# Altium footprint library SYNCBOX_V3I1.PcbLib: 251 footprints (part 4 of 16)
Each footprint in its own frame and in the unit in brackets; x right, y up, seen from the top. Pads: shape width x height; smd on the part's side, far side on the other; paste and mask are expansions set on the pad; w line width, h text height; cw(c..) or ccw(c..) is an arc to the next point about the centre after c.
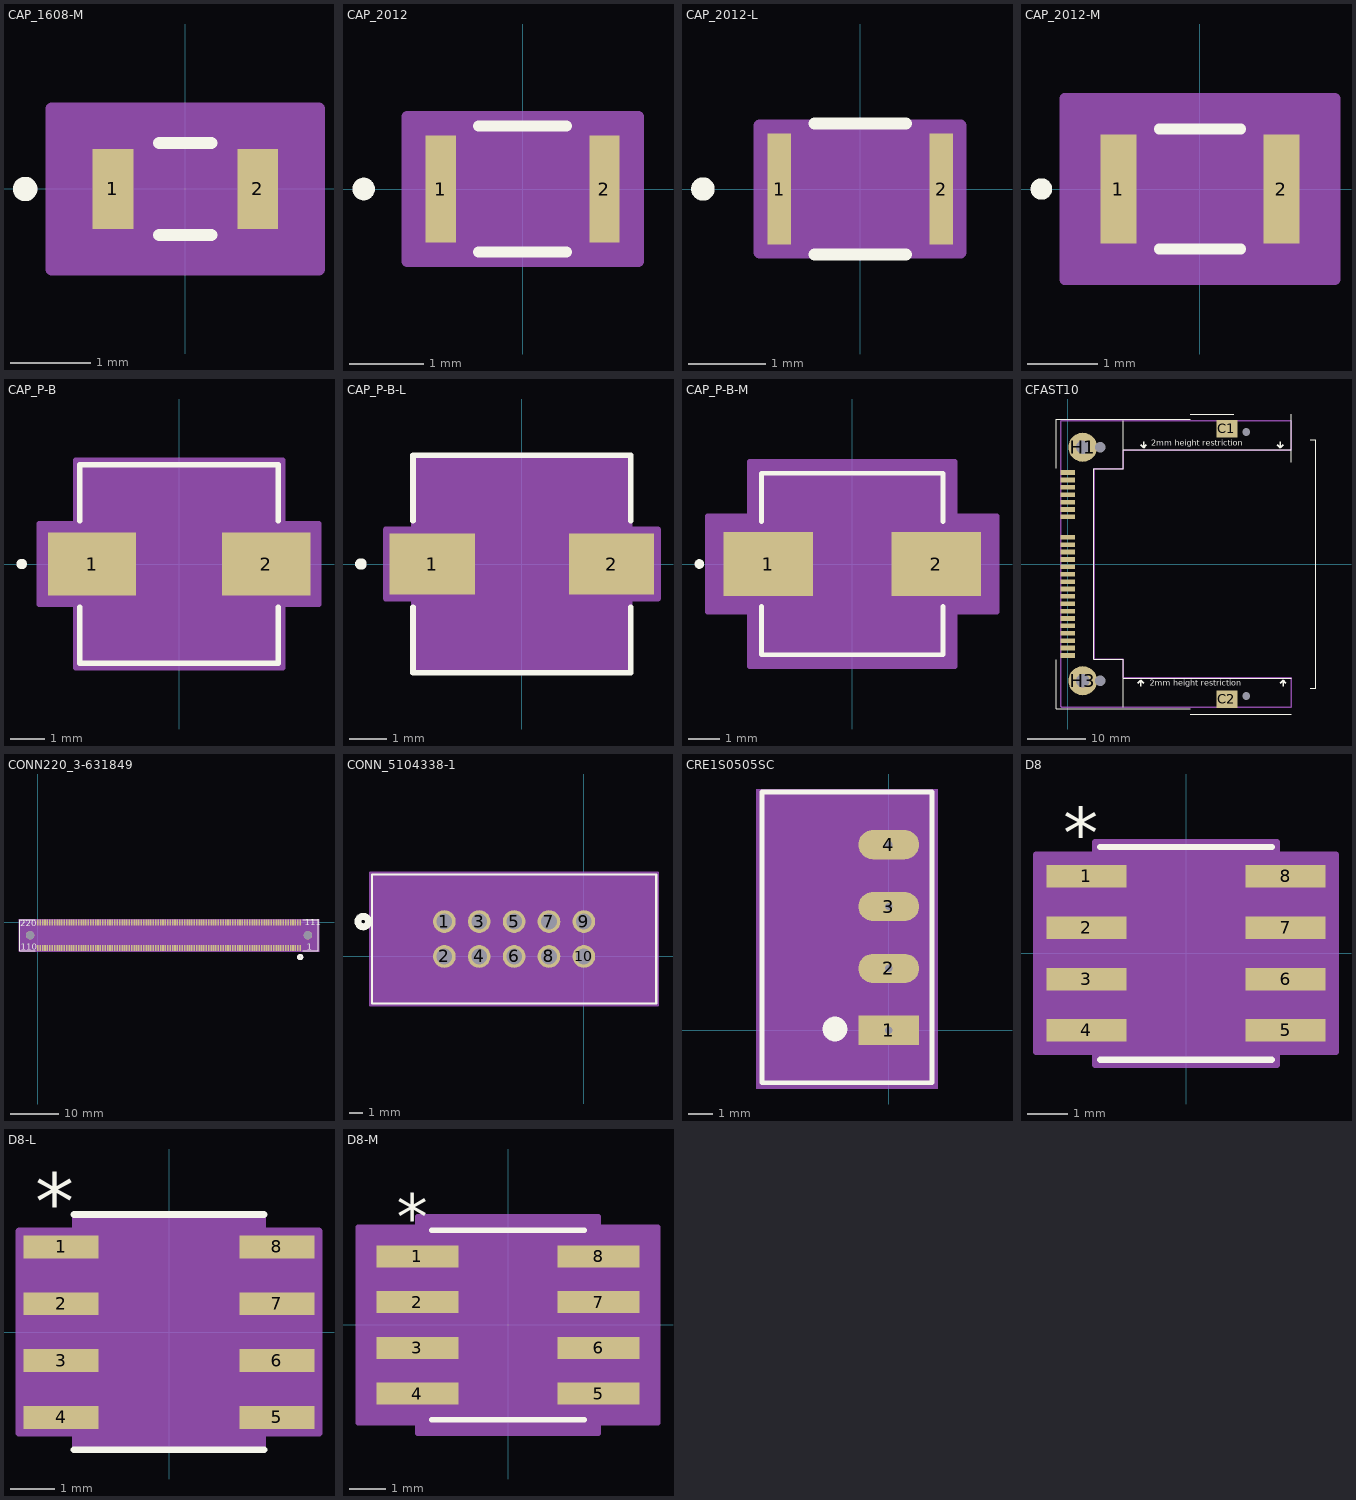
[diagram p3: the footprints below, top view; thin cyan lines are the x and y axes]

## CAP_1608-M [mil]
pads (2):
  rect 20x39 smd paste+0 mask+0: 1(-35.5,0) 2(35.5,0)
Top Overlay:
  circle w6: c-78.5,0 r3
  lines w6: -12.75,-22.5 12.75,-22.5 ; -12.75,22.5 12.75,22.5
Mechanical 13:
  circle w0: c-30.5,0 r3
  lines w1: -33.5,-17.5 -33.5,17.5 ; -33.5,-17.5 -25.5,-17.5 -25.5,17.5 -33.5,17.5 ; -33.5,-17.5 33.5,-17.5 ; -33.5,-17.5 -33.5,17.5 ; -33.5,17.5 33.5,17.5 ; 33.5,-17.5 25.5,-17.5 25.5,17.5 33.5,17.5 ; 33.5,-17.5 33.5,17.5 ; 33.5,-17.5 33.5,17.5
Mechanical 15:
  region: 65.5,-39.5 -65.5,-39.5 -65.5,39.5 65.5,39.5
  lines w6: -65.5,-39.5 -65.5,39.5 65.5,39.5 65.5,-39.5 -65.5,-39.5
3D body "CAP_1608-M.stp": height 35, standoff 0, extent -33.5,-17.48 33.51,17.48
3D body: height 10, standoff 0, extent 0,0 10,10

## CAP_2012 [mil]
pads (2):
  rect 16x57 smd paste+0 mask+0: 1(-43.5,0) 2(43.5,0)
Top Overlay:
  circle w6: c-84.5,0 r3
  lines w6: -23.39,-33.5 23.39,-33.5 ; -23.39,33.5 23.39,33.5
Mechanical 13:
  circle w0: c-38.5,0 r3
  lines w1: -43.5,-28.5 -43.5,28.5 ; -43.5,-28.5 -35.5,-28.5 -35.5,28.5 -43.5,28.5 ; -43.5,-28.5 43.5,-28.5 ; -43.5,-28.5 -43.5,28.5 ; -43.5,28.5 43.5,28.5 ; 43.5,-28.5 35.5,-28.5 35.5,28.5 43.5,28.5 ; 43.5,-28.5 43.5,28.5 ; 43.5,-28.5 43.5,28.5
Mechanical 15:
  region: 61.5,-38.5 -61.5,-38.5 -61.5,38.5 61.5,38.5
  lines w6: -61.5,-38.5 -61.5,38.5 61.5,38.5 61.5,-38.5 -61.5,-38.5
3D body: height 10, standoff 0, extent 0,0 10,10
3D body "CAP_2012.stp": height 49.02, standoff 0, extent -43.5,-28.5 43.5,28.5

## CAP_2012-L [mil]
pads (2):
  rect 12x57 smd paste+0 mask+0: 1(-41.5,0) 2(41.5,0)
Top Overlay:
  circle w6: c-80.5,0 r3
  lines w6: -23.39,-33.5 23.39,-33.5 ; -23.39,33.5 23.39,33.5
Mechanical 13:
  circle w0: c-36.5,0 r3
  lines w1: -43.5,-28.5 -43.5,28.5 ; -43.5,-28.5 -35.5,-28.5 -35.5,28.5 -43.5,28.5 ; -43.5,-28.5 43.5,-28.5 ; -43.5,-28.5 -43.5,28.5 ; -43.5,28.5 43.5,28.5 ; 43.5,-28.5 35.5,-28.5 35.5,28.5 43.5,28.5 ; 43.5,-28.5 43.5,28.5 ; 43.5,-28.5 43.5,28.5
Mechanical 15:
  region: 51.5,-32.5 -51.5,-32.5 -51.5,32.5 51.5,32.5
  lines w6: -51.5,-32.5 -51.5,32.5 51.5,32.5 51.5,-32.5 -51.5,-32.5
3D body: height 10, standoff 0, extent 0,0 10,10
3D body "CAP_2012-L.stp": height 49.02, standoff 0, extent -43.5,-28.5 43.51,28.51

## CAP_2012-M [mil]
pads (2):
  rect 20x61 smd paste+0 mask+0: 1(-45.5,0) 2(45.5,0)
Top Overlay:
  circle w6: c-88.5,0 r3
  lines w6: -22.75,-33.5 22.75,-33.5 ; -22.75,33.5 22.75,33.5
Mechanical 13:
  circle w0: c-40.5,0 r3
  lines w1: -43.5,-28.5 -43.5,28.5 ; -43.5,-28.5 -35.5,-28.5 -35.5,28.5 -43.5,28.5 ; -43.5,-28.5 43.5,-28.5 ; -43.5,-28.5 -43.5,28.5 ; -43.5,28.5 43.5,28.5 ; 43.5,-28.5 35.5,-28.5 35.5,28.5 43.5,28.5 ; 43.5,-28.5 43.5,28.5 ; 43.5,-28.5 43.5,28.5
Mechanical 15:
  region: 75.5,-50.5 -75.5,-50.5 -75.5,50.5 75.5,50.5
  lines w6: -75.5,-50.5 -75.5,50.5 75.5,50.5 75.5,-50.5 -75.5,-50.5
3D body: height 10, standoff 0, extent 0,0 10,10
3D body "CAP_2012-M.stp": height 49.02, standoff 0, extent -43.5,-28.5 43.51,28.51

## CAP_P-B [mil]
pads (2):
  rect 101x72 smd paste+0 mask+0: 1(-99.5,0) 2(99.5,0)
Top Overlay:
  circle w6: c-180,0 r3
  lines w6: -113.5,-49.1 -113.5,-113.5 113.5,-113.5 113.5,-49.1 ; -113.5,49.1 -113.5,113.5 113.5,113.5 113.5,49.1
Mechanical 13:
  circle w0: c-88.5,0 r3
  lines w1: -108.5,-54.25 -54.25,-108.5 ; -108.5,54.25 -54.25,108.5 ; -108.5,-108.5 108.5,-108.5 108.5,108.5 -108.5,108.5 -108.5,-108.5
Mechanical 15:
  region: -118.5,-46 -160,-46 -160,46 -118.5,46 -118.5,118.5 118.5,118.5 118.5,46 160,46 160,-46 118.5,-46 118.5,-118.5 -118.5,-118.5
  lines w6: -160,-46 -160,46 -118.5,46 -118.5,118.5 118.5,118.5 118.5,46 160,46 160,-46 118.5,-46 118.5,-118.5 -118.5,-118.5 -118.5,-46 -160,-46
3D body: height 10, standoff 0, extent 0,0 10,10
3D body "P-B.step": height 234.09, standoff 0, extent -122,-108.5 122.01,108.51

## CAP_P-B-L [mil]
pads (2):
  rect 89x64 smd paste+0 mask+0: 1(-93.5,0) 2(93.5,0)
Top Overlay:
  circle w6: c-168,0 r3
  lines w6: -113.5,-45.1 -113.5,-113.5 113.5,-113.5 113.5,-45.1 ; -113.5,45.1 -113.5,113.5 113.5,113.5 113.5,45.1
Mechanical 13:
  circle w0: c-88.5,0 r3
  lines w1: -108.5,-54.25 -54.25,-108.5 ; -108.5,54.25 -54.25,108.5 ; -108.5,-108.5 108.5,-108.5 108.5,108.5 -108.5,108.5 -108.5,-108.5
Mechanical 15:
  region: -112.5,-36 -142,-36 -142,36 -112.5,36 -112.5,112.5 112.5,112.5 112.5,36 142,36 142,-36 112.5,-36 112.5,-112.5 -112.5,-112.5
  lines w6: -142,-36 -142,36 -112.5,36 -112.5,112.5 112.5,112.5 112.5,36 142,36 142,-36 112.5,-36 112.5,-112.5 -112.5,-112.5 -112.5,-36 -142,-36
3D body: height 10, standoff 0, extent 0,0 10,10
3D body "P-B-L.step": height 234.09, standoff 0, extent -122,-108.5 122.01,108.5

## CAP_P-B-M [mil]
pads (2):
  rect 112x80 smd paste+0 mask+0: 1(-105,0) 2(105,0)
Top Overlay:
  circle w6: c-191,0 r3
  lines w6: -113.5,-53.1 -113.5,-113.5 113.5,-113.5 113.5,-53.1 ; -113.5,53.1 -113.5,113.5 113.5,113.5 113.5,53.1
Mechanical 13:
  circle w0: c-88.5,0 r3
  lines w1: -108.5,-54.25 -54.25,-108.5 ; -108.5,54.25 -54.25,108.5 ; -108.5,-108.5 108.5,-108.5 108.5,108.5 -108.5,108.5 -108.5,-108.5
Mechanical 15:
  region: -128.5,-60 -181,-60 -181,60 -128.5,60 -128.5,128.5 128.5,128.5 128.5,60 181,60 181,-60 128.5,-60 128.5,-128.5 -128.5,-128.5
  lines w6: -181,-60 -181,60 -128.5,60 -128.5,128.5 128.5,128.5 128.5,60 181,60 181,-60 128.5,-60 128.5,-128.5 -128.5,-128.5 -128.5,-60 -181,-60
3D body: height 10, standoff 0, extent 0,0 10,10
3D body "P-B-M.step": height 234.09, standoff 0, extent -122,-108.5 122.01,108.51

## CFAST10 [mm]
pads (32):
  rect 3.6x3 smd: C1(27.35,23.3) C2(27.35,-23.3)
  round 5 hole 2.3 mask+0.025: H1(2.55,20.08) H3(2.55,-20.08)
  round 0 hole 1.75 unplated: H2(5.55,20.08) H4(5.55,-20.08)
  round 0 hole 1.35 unplated: H5(30.65,22.7) H6(30.65,-22.7)
  rect 2.5x0.8 smd: PC1(0,4.595) PC2(0,3.325) PC3(0,2.055) PC4(0,0.785) PC5(0,-0.485) PC6(0,-1.755) PC7(0,-3.025) PC8(0,-4.295) PC9(0,-5.565) PC10(0,-6.835) PC11(0,-8.105) PC12(0,-9.375) PC13(0,-10.645) PC14(0,-11.915) PC15(0,-13.185) PC16(0,-14.455) PC17(0,-15.725) S1(0,15.725) S2(0,14.455) S3(0,13.185) S4(0,11.915) S5(0,10.645) S6(0,9.375) S7(0,8.105)
Top Overlay:
  lines w0.2: -2,-16.5 -2,-24.9 21,-24.9 ; -2,16.5 -2,24.9 21,24.9 ; 9.47,-24.6 9.47,-16.4 4.47,-16.4 4.47,16.4 9.47,16.4 9.47,24.6 ; 9.47,-19.615 38.4,-19.615 ; 9.47,19.615 38.4,19.615 ; 21,-25.8 38.4,-25.8 ; 21,25.8 28.5,25.8 ; 38.4,17.5 38.4,25.8 ; 41.7,-21.4 42.6,-21.4 42.6,21.4 41.7,21.4
  lines w0.254: 12,-20.5 12.5,-20 ; 12.5,-21 12.5,-20 ; 12.5,20.5 13,20 ; 13,-20.5 12.5,-20 ; 13,21 13,20 ; 13.5,20.5 13,20 ; 36,20.5 36.5,20 ; 36.5,-20.5 37,-20 ; 36.5,21 36.5,20 ; 37,-21 37,-20 ; 37,20.5 36.5,20 ; 37.5,-20.5 37,-20 ; 36.5,20 36.5,20
  text "2mm height restriction" at 14.3,20.3 h1
  text "2mm height restriction" at 14.1,-20.9 h1
Mechanical 16:
  lines w0.254: -1.2,-24.5 -1.2,24.6 38.4,24.6 38.4,19.6 9.5,19.6 9.5,16.5 9.4,16.4 4.5,16.4 4.5,-16.4 9.5,-16.4 9.5,-19.6 38.4,-19.6 38.4,-24.6 -1.1,-24.6 -1.2,-24.5
Mechanical 29:
  text ".Designator" at 0.9,1 h1.52
3D body "N7G24-AOB2-XX-10-OHT_STP.stp": height 7.69, standoff -0.91, extent -1.03,-24.25 38.2,24.25

## CFAST_LOCKER [mm]
3D body "7E50-C016-00_STP.stp": height 9.7, standoff 1.42, extent -22.415,-19.247 24.815,29.371

## COMe-mBT10 [mm] "Computer on Module Type 10 3D Model"
3D body "COMe-mBT10.STEP": height -42.13, standoff -50.38, extent -30.316,46.914 53.684,101.914

## CONN220_3-631849 [mil]
pads (222):
  rect 13x47 smd paste+0 mask+0: 1(2145.67,-208.66) 2(2125.98,-208.66) 3(2106.3,-208.66) 4(2086.61,-208.66) 5(2066.93,-208.66) 6(2047.24,-208.66) 7(2027.56,-208.66) 8(2007.87,-208.66) 9(1988.19,-208.66) 10(1968.5,-208.66) 11(1948.82,-208.66) 12(1929.13,-208.66) 13(1909.45,-208.66) 14(1889.76,-208.66) 15(1870.08,-208.66) 16(1850.39,-208.66) 17(1830.71,-208.66) 18(1811.02,-208.66) 19(1791.34,-208.66) 20(1771.65,-208.66) 21(1751.97,-208.66) 22(1732.28,-208.66) 23(1712.6,-208.66) 24(1692.91,-208.66) 25(1673.23,-208.66) 26(1653.54,-208.66) 27(1633.86,-208.66) 28(1614.17,-208.66) 29(1594.49,-208.66) 30(1574.8,-208.66) 31(1555.12,-208.66) 32(1535.43,-208.66) 33(1515.75,-208.66) 34(1496.06,-208.66) 35(1476.38,-208.66) 36(1456.69,-208.66) 37(1437.01,-208.66) 38(1417.32,-208.66) 39(1397.64,-208.66) 40(1377.95,-208.66) 41(1358.27,-208.66) 42(1338.58,-208.66) 43(1318.9,-208.66) 44(1299.21,-208.66) 45(1279.53,-208.66) 46(1259.84,-208.66) 47(1240.16,-208.66) 48(1220.47,-208.66) 49(1200.79,-208.66) 50(1181.1,-208.66) 51(1161.42,-208.66) 52(1141.73,-208.66) 53(1122.05,-208.66) 54(1102.36,-208.66) 55(1082.68,-208.66) 56(1062.99,-208.66) 57(1043.31,-208.66) 58(1023.62,-208.66) 59(1003.94,-208.66) 60(984.25,-208.66) 61(964.57,-208.66) 62(944.88,-208.66) 63(925.2,-208.66) 64(905.51,-208.66) 65(885.83,-208.66) 66(866.14,-208.66) 67(846.46,-208.66) 68(826.77,-208.66) 69(807.09,-208.66) 70(787.4,-208.66) 71(767.72,-208.66) 72(748.03,-208.66) 73(728.35,-208.66) 74(708.66,-208.66) 75(688.98,-208.66) 76(669.29,-208.66) 77(649.61,-208.66) 78(629.92,-208.66) 79(610.24,-208.66) 80(590.55,-208.66) 81(570.87,-208.66) 82(551.18,-208.66) 83(531.5,-208.66) 84(511.81,-208.66) 85(492.13,-208.66) 86(472.44,-208.66) 87(452.76,-208.66) 88(433.07,-208.66) 89(413.39,-208.66) 90(393.7,-208.66) 91(374.02,-208.66) 92(354.33,-208.66) 93(334.65,-208.66) 94(314.96,-208.66) 95(295.28,-208.66) 96(275.59,-208.66) 97(255.91,-208.66) 98(236.22,-208.66) 99(216.54,-208.66) 100(196.85,-208.66) 101(177.17,-208.66) 102(157.48,-208.66) 103(137.8,-208.66) 104(118.11,-208.66) 105(98.43,-208.66) 106(78.74,-208.66) 107(59.06,-208.66) 108(39.37,-208.66) 109(19.69,-208.66) 110(0,-208.66) 111(2145.67,0) 112(2125.98,0) 113(2106.3,0) 114(2086.61,0) 115(2066.93,0) 116(2047.24,0) 117(2027.56,0) 118(2007.87,0) 119(1988.19,0) 120(1968.5,0) 121(1948.82,0) 122(1929.13,0) 123(1909.45,0) 124(1889.76,0) 125(1870.08,0) 126(1850.39,0) 127(1830.71,0) 128(1811.02,0) 129(1791.34,0) 130(1771.65,0) 131(1751.97,0) 132(1732.28,0) 133(1712.6,0) 134(1692.91,0) 135(1673.23,0) 136(1653.54,0) 137(1633.86,0) 138(1614.17,0) 139(1594.49,0) 140(1574.8,0) 141(1555.12,0) 142(1535.43,0) 143(1515.75,0) 144(1496.06,0) 145(1476.38,0) 146(1456.69,0) 147(1437.01,0) 148(1417.32,0) 149(1397.64,0) 150(1377.95,0) 151(1358.27,0) 152(1338.58,0) 153(1318.9,0) 154(1299.21,0) 155(1279.53,0) 156(1259.84,0) 157(1240.16,0) 158(1220.47,0) 159(1200.79,0) 160(1181.1,0) 161(1161.42,0) 162(1141.73,0) 163(1122.05,0) 164(1102.36,0) 165(1082.68,0) 166(1062.99,0) 167(1043.31,0) 168(1023.62,0) 169(1003.94,0) 170(984.25,0) 171(964.57,0) 172(944.88,0) 173(925.2,0) 174(905.51,0) 175(885.83,0) 176(866.14,0) 177(846.46,0) 178(826.77,0) 179(807.09,0) 180(787.4,0) 181(767.72,0) 182(748.03,0) 183(728.35,0) 184(708.66,0) 185(688.98,0) 186(669.29,0) 187(649.61,0) 188(629.92,0) 189(610.24,0) 190(590.55,0) 191(570.87,0) 192(551.18,0) 193(531.5,0) 194(511.81,0) 195(492.13,0) 196(472.44,0) 197(452.76,0) 198(433.07,0) 199(413.39,0) 200(393.7,0) 201(374.02,0) 202(354.33,0) 203(334.65,0) 204(314.96,0) 205(295.28,0) 206(275.59,0) 207(255.91,0) 208(236.22,0) 209(216.54,0) 210(196.85,0) 211(177.17,0) 212(157.48,0) 213(137.8,0) 214(118.11,0) 215(98.43,0) 216(78.74,0) 217(59.06,0) 218(39.37,0) 219(19.69,0) 220(0,0)
  round 69 / inner round 60 / far side round 69 hole 69: 221(-63.17,-104.33) 222(2208.83,-104.33)
Top Overlay:
  circle w20: c2145.67,-283.66 r15
  lines w6: -19.6,-231.33 -148.67,-231.33 -148.67,22.67 -19.6,22.67 ; 2165.27,-231.33 2294.33,-231.33 2294.33,22.67 2165.24,22.67
  text "220" at -142,-32 h50
  text "110" at -138,-224 h50
  text "111" at 2182.5,-25 h50
  text "1" at 2197.5,-225 h50
Mechanical 13:
  circle w20: c2145.67,-283.66 r15
  lines w1: -143.67,-226.33 -143.67,17.67 2289.33,17.67 2289.33,-226.33 -143.67,-226.33
  text "220" at -142,-33 h50
  text "110" at -138,-224 h50
  text "111" at 2182.5,-25 h50
  text "1" at 2197.5,-225 h50
Mechanical 15:
  region: 2299.33,27.67 -153.67,27.67 -153.67,-236.33 2299.33,-236.33
  lines w6: -153.67,-236.33 2299.33,-236.33 2299.33,27.67 -153.67,27.67 -153.67,-236.33
3D body "c-3-6318491-6-c1-3d.stp": height 292, standoff -24.93, extent -143.07,-224.05 2290,20.05
3D body: height 10, standoff 0, extent 0,0 10,10

## CONN_5104338-1 [mil]
pads (10):
  round 65 / inner round 60 / far side round 65 hole 45 paste+0 mask+0: 1(-400,100) 2(-400,0) 3(-300,100) 4(-300,0) 5(-200,100) 6(-200,0) 7(-100,100) 8(-100,0) 9(0,100) 10(0,0)
Top Overlay:
  circle w20: c-632.5,100 r15
  lines w6: -607.5,-135 207.5,-135 207.5,235 -607.5,235 -607.5,-135
Bottom Overlay:
  circle w20: c-632.5,100 r15
Mechanical 13:
  circle w20: c-400,175 r15
  lines w1: -602.5,-130 202.5,-130 202.5,230 -602.5,230 -602.5,-130
Mechanical 15:
  region: 212.5,240 -612.5,240 -612.5,-140 212.5,-140
  region: 202.5,230 -602.5,230 -602.5,-130 202.5,-130
  lines w6: -612.5,-140 -612.5,240 212.5,240 212.5,-140 -612.5,-140
3D body: height 10, standoff 0, extent 0,0 10,10
3D body "702461004.stp": height 289.96, standoff -210, extent -600,-125 200,225

## CRE1S0505SC [mm]
pads (4):
  rect 2.5x1.2 hole 0.3 square: 1(0,0)
  oval 2.5x1.2 hole 0.3 square: 2(0,2.54) 3(0,5.08) 4(0,7.62)
Top Overlay:
  circle w0.508: c-2.21,0.051 r0.254
  lines w0.2: -5.207,-2.159 -5.207,9.779 1.778,9.779 1.778,-2.159 -5.207,-2.159
Mechanical 15:
  rectangle: -5.461,-2.413 2.032,9.906
3D body "mps_dcdc_cre1s_sc_a.step": height 10.19, standoff -3.91, extent -4.953,-2.209 1.167,9.321

## D8 [mil]
pads (8):
  rect 78x22 smd paste+0 mask+0: 1(-97,75) 2(-97,25) 3(-97,-25) 4(-97,-75) 5(97,-75) 6(97,-25) 7(97,25) 8(97,75)
Top Overlay:
  lines w6: -83.5,-103.5 83.5,-103.5 ; -83.5,103.5 83.5,103.5
  text "*" at -119.5,92 h50
Mechanical 13:
  lines w0: -12,98.5 ccw(c0,98.5) 12,98.5
  lines w1: -122,-85 -78.5,-85 -78.5,-65 -122,-65 -122,-85 ; -122,-35 -78.5,-35 -78.5,-15 -122,-15 -122,-35 ; -122,15 -78.5,15 -78.5,35 -122,35 -122,15 ; -122,65 -78.5,65 -78.5,85 -122,85 -122,65 ; -78.5,-98.5 -78.5,98.5 78.5,98.5 78.5,-98.5 -78.5,-98.5 ; 78.5,-85 122,-85 122,-65 78.5,-65 78.5,-85 ; 78.5,-35 122,-35 122,-15 78.5,-15 78.5,-35 ; 78.5,15 122,15 122,35 78.5,35 78.5,15 ; 78.5,65 122,65 122,85 78.5,85 78.5,65
  text "*" at -76,45.5 h50
Mechanical 15:
  region: -88.5,-96 -146,-96 -146,96 -88.5,96 -88.5,108.5 88.5,108.5 88.5,96 146,96 146,-96 88.5,-96 88.5,-108.5 -88.5,-108.5
  lines w6: -146,-96 -88.5,-96 -88.5,-108.5 88.5,-108.5 88.5,-96 146,-96 146,96 88.5,96 88.5,108.5 -88.5,108.5 -88.5,96 -146,96 -146,-96
3D body: height 10, standoff 0, extent 0,0 10,10
3D body "D8.step": height 69.09, standoff 0, extent -122,-98.5 122.01,98.51

## D8-L [mil]
pads (8):
  rect 66x20 smd paste+0 mask+0: 1(-95,75) 2(-95,25) 3(-95,-25) 4(-95,-75) 5(95,-75) 6(95,-25) 7(95,25) 8(95,75)
Top Overlay:
  lines w6: -83.5,-103.5 83.5,-103.5 ; -83.5,103.5 83.5,103.5
  text "*" at -117.5,90 h50
Mechanical 13:
  lines w0: -12,98.5 ccw(c0,98.5) 12,98.5
  lines w1: -122,-85 -78.5,-85 -78.5,-65 -122,-65 -122,-85 ; -122,-35 -78.5,-35 -78.5,-15 -122,-15 -122,-35 ; -122,15 -78.5,15 -78.5,35 -122,35 -122,15 ; -122,65 -78.5,65 -78.5,85 -122,85 -122,65 ; -78.5,-98.5 -78.5,98.5 78.5,98.5 78.5,-98.5 -78.5,-98.5 ; 78.5,-85 122,-85 122,-65 78.5,-65 78.5,-85 ; 78.5,-35 122,-35 122,-15 78.5,-15 78.5,-35 ; 78.5,15 122,15 122,35 78.5,35 78.5,15 ; 78.5,65 122,65 122,85 78.5,85 78.5,65
  text "*" at -76,45.5 h50
Mechanical 15:
  region: -82.5,-89 -132,-89 -132,89 -82.5,89 -82.5,102.5 82.5,102.5 82.5,89 132,89 132,-89 82.5,-89 82.5,-102.5 -82.5,-102.5
  lines w6: -132,-89 -82.5,-89 -82.5,-102.5 82.5,-102.5 82.5,-89 132,-89 132,89 82.5,89 82.5,102.5 -82.5,102.5 -82.5,89 -132,89 -132,-89
3D body: height 10, standoff 0, extent 0,0 10,10
3D body "D8-L.step": height 69.09, standoff 0, extent -122,-98.5 122.01,98.51

## D8-M [mil]
pads (8):
  rect 90x24 smd paste+0 mask+0: 1(-99,75) 2(-99,25) 3(-99,-25) 4(-99,-75) 5(99,-75) 6(99,-25) 7(99,25) 8(99,75)
Top Overlay:
  lines w6: -83.5,-103.5 83.5,-103.5 ; -83.5,103.5 83.5,103.5
  text "*" at -121.5,94 h50
Mechanical 13:
  lines w0: -12,98.5 ccw(c0,98.5) 12,98.5
  lines w1: -122,-85 -78.5,-85 -78.5,-65 -122,-65 -122,-85 ; -122,-35 -78.5,-35 -78.5,-15 -122,-15 -122,-35 ; -122,15 -78.5,15 -78.5,35 -122,35 -122,15 ; -122,65 -78.5,65 -78.5,85 -122,85 -122,65 ; -78.5,-98.5 -78.5,98.5 78.5,98.5 78.5,-98.5 -78.5,-98.5 ; 78.5,-85 122,-85 122,-65 78.5,-65 78.5,-85 ; 78.5,-35 122,-35 122,-15 78.5,-15 78.5,-35 ; 78.5,15 122,15 122,35 78.5,35 78.5,15 ; 78.5,65 122,65 122,85 78.5,85 78.5,65
  text "*" at -76,45.5 h50
Mechanical 15:
  region: -98.5,-107 -164,-107 -164,107 -98.5,107 -98.5,118.5 98.5,118.5 98.5,107 164,107 164,-107 98.5,-107 98.5,-118.5 -98.5,-118.5
  lines w6: -164,-107 -98.5,-107 -98.5,-118.5 98.5,-118.5 98.5,-107 164,-107 164,107 98.5,107 98.5,118.5 -98.5,118.5 -98.5,107 -164,107 -164,-107
3D body: height 10, standoff 0, extent 0,0 10,10
3D body "D8-M.step": height 69.09, standoff 0, extent -122,-98.5 122.01,98.51